# Altium integrated library GRM1555C1H102FA01D.IntLib: 1 symbol
Pins are listed as number, name and electrical type; pins without a type are passive.

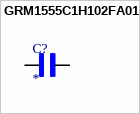
[diagram p0: symbol GRM1555C1H102FA01D]

## GRM1555C1H102FA01D
designator C?
SMD capacitor C0G(EIA) with capacitance 1000pF Tol.1%. Rated voltage 50Vdc 125C; MF: Murata; MP: GRM1555C1H102FA01D; SnapEDA_Link: https://www.snapeda.com/parts/GRM1555C1H102FA01D/Murata/view-part/?ref=snap; Package: 1005-2 Murata; Value: *; Check_prices: https://www.snapeda.com/parts/GRM1555C1H102FA01D/Murata/view-part/?ref=eda
footprint CAPC1005X55N
pins: 1, 2